# Altium integrated library Karta Radiowa.IntLib: 43 symbols (part 2 of 2)
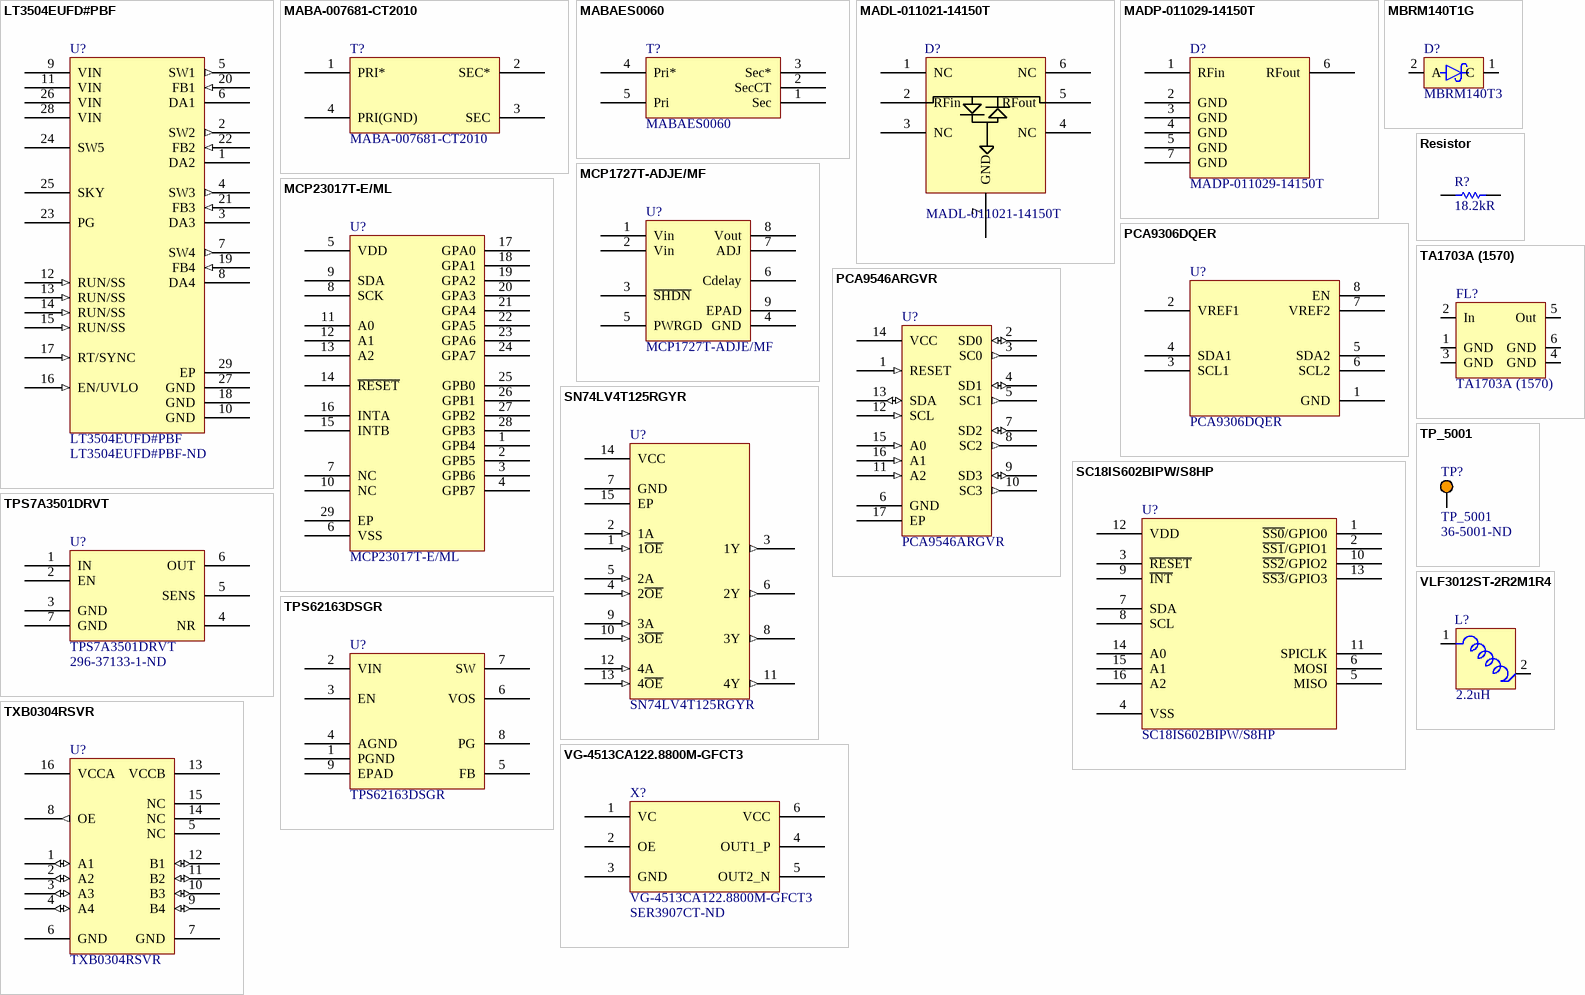
[diagram p2: symbols LT3504EUFD#PBF to VLF3012ST-2R2M1R4]

## PCA9306DQER
designator U?
TEXAS INSTRUMENTS   PCA9306DQER.   IC, SMBus, 5V, X2SON-8; Number of Channels: 2; Propagation Delay: 0.3ns; Min Supply Voltage: 0uV; Logic Function: Translator; Turn-On Delay Time: 1.4ns; Low Level Output Current: 128mA; Output Type: I2C; Supplier 1: Digi-Key; Manufacturer 1: Texas Instruments; Manufacturer Part Number 1: PCA9306DQER; Stock 1: 25002; Pricing 1: 1=0,67000, 10=0,59100, 100=0,45340, 500=0,35844, 1000=0,28675 (USD); RoHS: Yes; Number of Pins: 8; Min Operating Temperature: -40°C; Max Operating Temperature: 85°C; Max Supply Voltage: 5V; Package Quantity: 1; Number of Outputs: 2; Number of Bits: 2; Packaging: Tape and Reel; Length: 1.45mm; Height: 0.35mm; Width: 1.05mm; Radiation Hardening: No; REACH SVHC: No SVHC; Lead Free: Lead Free; ComponentLink1URL: https://datasheet.ciiva.com/22631/1719693-22631024.pdf?src-supplier=Element14; ComponentLink1Description: https://datasheet.ciiva.com/22631/1719693-22631024.pdf?src-supplier=Element14; ComponentLink2URL: https://datasheet.ciiva.com/1899/pca9306-1899328.pdf?src-supplier=Digi-Key; ComponentLink2Description: https://datasheet.ciiva.com/1899/pca9306-1899328.pdf?src-supplier=Digi-Key; ComponentLink3URL: https://datasheet.ciiva.com/15095/getdatasheetpartid-306496-15095555.pdf?src-supplier=Verical; ComponentLink3Description: https://datasheet.ciiva.com/15095/getdatasheetpartid-306496-15095555.pdf?src-supplier=Verical; ComponentLink4URL: https://datasheet.ciiva.com/1504/1862428-1504149.pdf?src-supplier=Element14; ComponentLink4Description: https://datasheet.ciiva.com/1504/1862428-1504149.pdf?src-supplier=Element14; ComponentLink5URL: https://datasheet.ciiva.com/1899/pca9306-1899326.pdf?src-supplier=Digi-Key; ComponentLink5Description: https://datasheet.ciiva.com/1899/pca9306-1899326.pdf?src-supplier=Digi-Key; ComponentLink6URL: https://datasheet.ciiva.com/14287/pca9306-14287374.pdf?src-supplier=Avnet; ComponentLink6Description: https://datasheet.ciiva.com/14287/pca9306-14287374.pdf?src-supplier=Avnet; ComponentLink7URL: https://datasheet.ciiva.com/14287/pca9306-14287470.pdf?src-supplier=Avnet; ComponentLink7Description: https://datasheet.ciiva.com/14287/pca9306-14287470.pdf?src-supplier=Avnet; ComponentLink8URL: https://datasheet.ciiva.com/1899/pca9306-1899327.pdf?src-supplier=Digi-Key; ComponentLink8Description: https://datasheet.ciiva.com/1899/pca9306-1899327.pdf?src-supplier=Digi-Key; ComponentLink9URL: https://datasheet.ciiva.com/26041/pca9306-26041014.pdf?src-supplier=Avnet+Europe; ComponentLink9Description: https://datasheet.ciiva.com/26041/pca9306-26041014.pdf?src-supplier=Avnet+Europe; Supplier Part Number 1: 296-27957-1-ND
footprint PCA9306 (8-XFDFN, Body 1,40x1,00mm, Pitch 0,35mm, IPC High Density)
pins: 1 GND, 2 VREF1, 3 SCL1, 4 SDA1, 5 SDA2, 6 SCL2, 7 VREF2, 8 EN

## PCA9546ARGVR
designator U?
IC I2C/SMBUS SWITCH 4CH 16-VQFN; Manufacturer 1: Texas Instruments; Number of Inputs: 4; Number of Outputs: 1; Max Supply Voltage: 5.5V; Min Supply Voltage: 2.3V; Logic Function: Multiplexer; Bandwidth: 400kHz; Propagation Delay: 1ns; Max Power Dissipation: 400mW; On-State Resistance: 45R; Operating Supply Current: 3uA; Supplier 1: Digi-Key; Manufacturer Part Number 1: PCA9546ARGVR; Stock 1: 3293; Pricing 1: 1=1.95000, 10=1.75200, 100=1.40850, 500=1.15720, 1000=0.95883 (USD); RoHS: Yes; Case/Package: VQFN; Number of Pins: 16; Contact Plating: Gold; Min Operating Temperature: -40°C; Max Operating Temperature: 85°C; Packaging: Tape and Reel; Package Quantity: 1; Number of Channels: 4; Power Dissipation: 400mW; Max Frequency: 400kHz; Nominal Supply Current: 3uA; Quiescent Current: 3uA; Radiation Hardening: No; Lead Free: Lead Free; ComponentLink1URL: https://datasheet.ciiva.com/15087/getdatasheetpartid-194420-15087222.pdf?src-supplier=Verical; ComponentLink1Description: https://datasheet.ciiva.com/15087/getdatasheetpartid-194420-15087222.pdf?src-supplier=Verical; ComponentLink2URL: https://datasheet.ciiva.com/26839/pca9546argvr-26839996.pdf?src-supplier=IIIC; ComponentLink2Description: https://datasheet.ciiva.com/26839/pca9546argvr-26839996.pdf?src-supplier=IIIC; ComponentLink3URL: https://datasheet.ciiva.com/1784/pca9546a-1784308.pdf?src-supplier=Digi-Key; ComponentLink3Description: https://datasheet.ciiva.com/1784/pca9546a-1784308.pdf?src-supplier=Digi-Key; ComponentLink4URL: https://datasheet.ciiva.com/1784/pca9546a-1784309.pdf?src-supplier=Digi-Key; ComponentLink4Description: https://datasheet.ciiva.com/1784/pca9546a-1784309.pdf?src-supplier=Digi-Key; ComponentLink5URL: https://datasheet.ciiva.com/1784/pca9546a-1784310.pdf?src-supplier=Digi-Key; ComponentLink5Description: https://datasheet.ciiva.com/1784/pca9546a-1784310.pdf?src-supplier=Digi-Key; ComponentLink6URL: https://datasheet.ciiva.com/29886/pca9546a-29886952.pdf?src-supplier=Avnet; ComponentLink6Description: https://datasheet.ciiva.com/29886/pca9546a-29886952.pdf?src-supplier=Avnet; ComponentLink7URL: https://datasheet.ciiva.com/14285/pca9546a-14285823.pdf?src-supplier=Avnet; ComponentLink7Description: https://datasheet.ciiva.com/14285/pca9546a-14285823.pdf?src-supplier=Avnet; Supplier Part Number 1: 296-21771-1-ND
footprint PCA9546A (RGV (S-PVQFN-N16))
pins: 1 RESET (in), 2 SD0 (io), 3 SC0 (out), 4 SD1 (io), 5 SC1 (out), 6 GND, 7 SD2 (io), 8 SC2 (out), 9 SD3 (io), 10 SC3 (out), 11 A2 (in), 12 SCL (in), 13 SDA (io), 14 VCC, 15 A0 (in), 16 A1 (in), 17 EP

## Resistor
designator R?, comment 18.2kR
Manufacturer 1: Susumu; Manufacturer Part Number 1: RR0510P-1822-D; Power Rating: 62.5mW; Tolerance: 0.5%; Voltage Rating: 25V; Max Power Dissipation: 63mW; Temperature Coefficient: 25ppm/°C; Voltage Rating (DC): 50V; Supplier 1: Digi-Key; Supplier Part Number 1: RR05P18.2KDCT-ND; Stock 1: 48500; Pricing 1: 1=0.10000, 10=0.07400, 100=0.02850, 1000=0.01254, 2500=0.01083, 5000=0.00969 (USD); RoHS: Yes; Case/Package: 0402; Case Code (Metric): 1005; Case Code (Imperial): 0402; Min Operating Temperature: -55°C; Max Operating Temperature: 125°C; Package Quantity: 1; Resistance: 18.2kR; Packaging: Tape and Reel; Composition: Thin Film; Number of Terminations: 2; Termination: SMD/SMT; Length: 0.039inch; Height: 0.016inch; Width: 0.02inch; Lead Free: Lead Free; ComponentLink1URL: https://datasheet.ciiva.com/2494/rr-data-sheet-2494006.pdf?src-supplier=Digi-Key; ComponentLink1Description: https://datasheet.ciiva.com/2494/rr-data-sheet-2494006.pdf?src-supplier=Digi-Key; ComponentLink2URL: https://datasheet.ciiva.com/2494/rr-data-sheet-2494007.pdf?src-supplier=Digi-Key; ComponentLink2Description: https://datasheet.ciiva.com/2494/rr-data-sheet-2494007.pdf?src-supplier=Digi-Key; ComponentLink3URL: https://datasheet.ciiva.com/2494/rr-data-sheet-2494008.pdf?src-supplier=Digi-Key; ComponentLink3Description: https://datasheet.ciiva.com/2494/rr-data-sheet-2494008.pdf?src-supplier=Digi-Key
footprint RES 0201/0603 (Chip Resistor, 2-Leads, Body 0.60x0.30mm, IPC Medium Density)
footprint RES 0402/1005 (Chip Resistor, 2-Leads, Body 1.0x0.5mm, IPC Medium Density)
footprint RES 0402/1005 RF (Chip Resistor, 2-Leads, Body 1.0x0.5mm, IPC High Density)
footprint RES 0603/1608 (Chip Resistor, 2-Leads, Body 1.60x0.80mm, IPC Medium Density)
footprint RES 0603/1608 RF (Chip Resistor, 2-Leads, Body 1.60x0.80mm, IPC High Density)
footprint RES 0805/2012 (Chip Resistor, 2-Leads, Body 2.00x1.25mm, IPC Medium Density)
footprint RES 0805/2012 RF (Chip Resistor, 2-Leads, Body 2.00x1.25mm, IPC High Density)
footprint RES 1206/3216 (Chip Resistor, 2-Leads, Body 3.13x1.55mm, IPC Medium Density)
footprint RES 1206/3216 RF (Chip Resistor, 2-Leads, Body 3.13x1.55mm, IPC High Density)
pins: 1, 2

## SC18IS602BIPW/S8HP
designator U?
IC BRIDGE SPI/I2C 16TSSOP; Manufacturer 1: NXP Semiconductors; Supplier 1: Digi-Key; Manufacturer Part Number 1: SC18IS602BIPW/S8HP; Stock 1: 121; Pricing 1: 1=2.76000, 10=2.47600, 100=2.02860, 500=1.72690, 1000=1.45642 (USD); RoHS: No; ComponentLink1URL: https://www.nxp.com/docs/en/data-sheet/SC18IS602B.pdf?src-supplier=Digi-Key; ComponentLink1Description: https://www.nxp.com/docs/en/data-sheet/SC18IS602B.pdf?src-supplier=Digi-Key; Supplier Part Number 1: 568-13691-1-ND
footprint SC18IS602B (TSSOP16: plastic thin shrink small outline package; 16 leads; body width 4.4 mm)
pins: 1 ~{SS0}/GPIO0, 2 ~{SS1}/GPIO1, 3 ~{RESET}, 4 VSS, 5 MISO, 6 MOSI, 7 SDA, 8 SCL, 9 ~{INT}, 10 ~{SS2}/GPIO2, 11 SPICLK, 12 VDD, 13 ~{SS3}/GPIO3, 14 A0, 15 A1, 16 A2

## SN74LV4T125RGYR
designator U?
level shifter Automotive 14-Pin VQFN EP T/R; Manufacturer 1: Texas Instruments; Number of Elements: 4; Number of Bits per Element: 1; High Level Output Current: 16mA; Logic Function: Buffer,Inverting,Translator; Quiescent Current: 2uA; Supplier 1: Digi-Key; Manufacturer Part Number 1: SN74LV4T125RGYR; Stock 1: 74112; Pricing 1: 1=1.15000, 10=1.03000, 100=0.80310, 500=0.66342, 1000=0.52376 (USD); RoHS: Yes; Mount: Surface Mount; Case/Package: VQFN; Number of Pins: 14; Contact Plating: Gold; Min Operating Temperature: -40°C; Max Operating Temperature: 125°C; Packaging: Tape and Reel; Low Level Output Current: 16mA; Number of Bits: 4; Radiation Hardening: No; Lead Free: Lead Free; ComponentLink1URL: https://datasheet.ciiva.com/48438/sn74lv4t125-48438269.pdf?src-supplier=Avnet; ComponentLink1Description: https://datasheet.ciiva.com/48438/sn74lv4t125-48438269.pdf?src-supplier=Avnet; Supplier Part Number 1: 296-40546-1-ND
footprint SN74LV4T125RGYR (14-VFQFN Exposed Pad)
pins: 1 1~{OE} (in), 2 1A (in), 3 1Y (out), 4 2~{OE} (in), 5 2A (in), 6 2Y (out), 7 GND, 8 3Y (out), 9 3A (in), 10 3~{OE} (in), 11 4Y (out), 12 4A (in), 13 4~{OE} (in), 14 VCC, 15 EP

## TA1703A (1570)
designator FL?
SAW Filter 1570 MHz; BW: 80 MHz; IL (max): 4.2 dB; Impedance In, Out: 50 Ohm; In Power (max): 10 dBm; Fc: 1570 MHz
footprint Tai-Saw_3x3p6 (TA1251B, 6-Pins, Body 3,00x3,00mmx1,40mm, Pitch 1,20mm, IPC Medium Density)
pins: 1 GND, 2 In, 3 GND, 4 GND, 5 Out, 6 GND

## TP_5001
designator TP?  Supplier Part Number 1: 36-5001-ND
Manufacturer 1: Keystone Electronics; Manufacturer Part Number 1: 5001; Plating: Silver; Body Material: PBT,Bronze; Number of Ports: 1; Insulation: Insulated; Inside Diameter: 1.27mm; Outside Diameter: 2.54mm; Hole Diameter: 1.6mm; Supplier 1: Digi-Key; Stock 1: 352170; Pricing 1: 1=0,35000, 10=0,33500, 25=0,30800, 100=0,30150, 250=0,28304, 500=0,25230, 1000=0,17140, 2500=0,15296, 5000=0,14340 (USD); RoHS: Yes; Mount: Through Hole,PCB; Color: Black; Contact Material: Bronze; Contact Plating: Silver,Tin; Material: Nylon,Bronze,Silver; Housing Color: Black; Packaging: Bulk; Package Quantity: 100; Termination: Through Hole; Number of Contacts: 1; Orientation: Straight; Diameter: 2.54mm; Length: 7.62mm; Height: 0.3inch; Lead Free: Lead Free; REACH SVHC: No SVHC; Flammability Rating: UL94 V-0; ComponentLink1URL: https://datasheet.ciiva.com/27052/1581986-27052611.pdf?src-supplier=Jameco; ComponentLink1Description: https://datasheet.ciiva.com/27052/1581986-27052611.pdf?src-supplier=Jameco; ComponentLink2URL: https://datasheet.ciiva.com/11836/0900766b8009b7c7-11836045.pdf?src-supplier=RSComponents; ComponentLink2Description: https://datasheet.ciiva.com/11836/0900766b8009b7c7-11836045.pdf?src-supplier=RSComponents; ComponentLink3URL: https://datasheet.ciiva.com/22631/1703983-22631100.pdf?src-supplier=Element14; ComponentLink3Description: https://datasheet.ciiva.com/22631/1703983-22631100.pdf?src-supplier=Element14; ComponentLink4URL: https://datasheet.ciiva.com/16318/m60-2p60-16318423.pdf?src-supplier=Future+Electronics; ComponentLink4Description: https://datasheet.ciiva.com/16318/m60-2p60-16318423.pdf?src-supplier=Future+Electronics
footprint Keystone5000 (For Keystone 500x miniature loop terminals)
pins: 1

## TPS7A3501DRVT
designator U?  Supplier Part Number 1: 296-37133-1-ND
TEXAS INSTRUMENTS         TPS7A3501DRVT            LDO Voltage Regulator, Adjustable, 1.71V to 5V in, 330mV drop, 1.21V to 4.5V/1A out, SON-6; Output Current: 1A; Number of Outputs: 1; Output Voltage: 4.5V; Min Current Limit: 1.1A; Polarity: Positive; Quiescent Current: 2.2mA; Supplier 1: Digi-Key; Manufacturer: Texas Instruments; Manufacturer Part Number: TPS7A3501DRVT; Stock 1: 4410; Pricing 1: 1 = 2,31000, 10 = 2,07200, 100 = 1,66520 (USD); RoHS: Yes; Mount: Surface Mount; Number of Pins: 6; Weight: 0.000342oz; Min Operating Temperature: -40°C; Max Operating Temperature: 125°C; Min Input Voltage: 1.71V; Max Input Voltage: 5V; Dropout Voltage: 330mV; Package Quantity: 250; Packaging: Tape and Reel; Max Output Current: 1A; Number of Regulators: 1; Min Output Voltage: 1.21V; Max Output Voltage: 4.5V; Output Type: Adjustable; Radiation Hardening: No; REACH SVHC: No SVHC; Lead Free: Lead Free; ComponentLink1URL: https://datasheet.ciiva.com/28435/1776766-28435910.pdf?src-supplier=Element14; ComponentLink1Description: https://datasheet.ciiva.com/28435/1776766-28435910.pdf?src-supplier=Element14; ComponentLink2URL: https://datasheet.ciiva.com/29569/tps7a3501-29569542.pdf?src-supplier=Digi-Key; ComponentLink2Description: https://datasheet.ciiva.com/29569/tps7a3501-29569542.pdf?src-supplier=Digi-Key; ComponentLink3URL: https://datasheet.ciiva.com/29569/tps7a3501-29569543.pdf?src-supplier=Digi-Key; ComponentLink3Description: https://datasheet.ciiva.com/29569/tps7a3501-29569543.pdf?src-supplier=Digi-Key; ComponentLink4URL: https://datasheet.ciiva.com/29569/tps7a3501-29569544.pdf?src-supplier=Digi-Key; ComponentLink4Description: https://datasheet.ciiva.com/29569/tps7a3501-29569544.pdf?src-supplier=Digi-Key; ComponentLink5URL: https://datasheet.ciiva.com/30016/tps7a3501-30016008.pdf?src-supplier=Avnet; ComponentLink5Description: https://datasheet.ciiva.com/30016/tps7a3501-30016008.pdf?src-supplier=Avnet
footprint TPS7A3501 (6-WDFN Exposed Pad)
pins: 1 IN, 2 EN, 3 GND, 4 NR, 5 SENS, 6 OUT, 7 GND

## TPS62163DSGR
designator U?
IC REG BUCK 5V 1A SYNC 8WSON; Manufacturer 1: Texas Instruments; Switching Frequency: 2.25MHz; Number of Outputs: 1; Max Input Voltage: 17V; Min Input Voltage: 3V; Synchronous Rectifier: Yes; Quiescent Current: 17uA; Output Type: Fixed; Output Configuration: Positive; Supplier 1: Digi-Key; Manufacturer Part Number 1: TPS62163DSGR; Stock 1: 19908; Pricing 1: 1=1.79000, 10=1.61000, 100=1.29440, 500=1.06348, 1000=0.88117 (USD); RoHS: Yes; Case/Package: SOIC; Number of Pins: 8; Contact Plating: Gold; Min Operating Temperature: -40°C; Max Operating Temperature: 125°C; Packaging: Tape and Reel; Package Quantity: 1; Output Voltage: 5V; Output Current: 1A; Max Output Current: 1A; Min Output Voltage: 5V; Max Output Voltage: 5V; Operating Supply Voltage: 17V; REACH SVHC: No SVHC; Lead Free: Lead Free; ComponentLink1URL: https://datasheet.ciiva.com/4880/slvsam2a-198231-4880752.pdf?src-supplier=Mouser; ComponentLink1Description: https://datasheet.ciiva.com/4880/slvsam2a-198231-4880752.pdf?src-supplier=Mouser; ComponentLink2URL: https://datasheet.ciiva.com/2034/tps62160-2034672.pdf?src-supplier=Digi-Key; ComponentLink2Description: https://datasheet.ciiva.com/2034/tps62160-2034672.pdf?src-supplier=Digi-Key; ComponentLink3URL: https://datasheet.ciiva.com/2034/tps62160-2034673.pdf?src-supplier=Digi-Key; ComponentLink3Description: https://datasheet.ciiva.com/2034/tps62160-2034673.pdf?src-supplier=Digi-Key; ComponentLink4URL: https://datasheet.ciiva.com/2034/tps62160-2034674.pdf?src-supplier=Digi-Key; ComponentLink4Description: https://datasheet.ciiva.com/2034/tps62160-2034674.pdf?src-supplier=Digi-Key; Supplier Part Number 1: 296-29898-1-ND
footprint TPS62163 (DSG0008A WSON - 0.8 mm max height)
pins: 1 PGND, 2 VIN, 3 EN, 4 AGND, 5 FB, 6 VOS, 7 SW, 8 PG, 9 EPAD

## TXB0304RSVR
designator U?
IC TRNSLTR BIDIRECTIONAL 16UQFN; Manufacturer 1: Texas Instruments; Nominal Supply Current: 5uA; Max Supply Voltage: 3.6V; Min Supply Voltage: 900mV; Data Rate: 140Mbps; Number of Channels: 4; Propagation Delay: 4.8ns; Logic Function: Translator; Turn-On Delay Time: 18.9ns; High Level Output Current: -20uA; Low Level Output Current: 20uA; Quiescent Current: 10uA; Supplier 1: Digi-Key; Manufacturer Part Number 1: TXB0304RSVR; Stock 1: 1758; Pricing 1: 1=1.45000, 10=1.29700, 100=1.01160, 500=0.83564, 1000=0.65972 (USD); RoHS: Yes; Mount: Surface Mount; Number of Pins: 16; Contact Plating: Gold; Min Operating Temperature: -40°C; Max Operating Temperature: 85°C; Packaging: Tape and Reel; Package Quantity: 1; Number of Bits: 4; Number of Inputs: 4; Number of Outputs: 4; Radiation Hardening: No; REACH SVHC: No SVHC; Lead Free: Lead Free; ComponentLink1URL: https://datasheet.ciiva.com/1900/txb0304-1900817.pdf?src-supplier=Digi-Key; ComponentLink1Description: https://datasheet.ciiva.com/1900/txb0304-1900817.pdf?src-supplier=Digi-Key; ComponentLink2URL: https://datasheet.ciiva.com/15096/getdatasheetpartid-490462-15096317.pdf?src-supplier=Verical; ComponentLink2Description: https://datasheet.ciiva.com/15096/getdatasheetpartid-490462-15096317.pdf?src-supplier=Verical; ComponentLink3URL: https://datasheet.ciiva.com/1900/txb0304-1900818.pdf?src-supplier=Digi-Key; ComponentLink3Description: https://datasheet.ciiva.com/1900/txb0304-1900818.pdf?src-supplier=Digi-Key; ComponentLink4URL: https://datasheet.ciiva.com/1900/txb0304-1900819.pdf?src-supplier=Digi-Key; ComponentLink4Description: https://datasheet.ciiva.com/1900/txb0304-1900819.pdf?src-supplier=Digi-Key; ComponentLink5URL: https://datasheet.ciiva.com/14287/txb0304-14287243.pdf?src-supplier=Avnet; ComponentLink5Description: https://datasheet.ciiva.com/14287/txb0304-14287243.pdf?src-supplier=Avnet; Supplier Part Number 1: 296-29681-1-ND
footprint TXB0304 (RSV0016A UQFN - 0.55 mm max height)
pins: 1 A1 (io), 2 A2 (io), 3 A3 (io), 4 A4 (io), 5 NC, 6 GND, 7 GND, 8 OE (out), 9 B4 (io), 10 B3 (io), 11 B2 (io), 12 B1 (io), 13 VCCB, 14 NC, 15 NC, 16 VCCA

## VG-4513CA122.8800M-GFCT3
designator X?  Supplier Part Number 1: SER3907CT-ND
OSC VCXO 122.88MHZ LVPECL SMD; Manufacturer: Epson; Max Supply Current: 65mA; Supplier 1: Digi-Key; Manufacturer Part Number: VG-4513CA122.8800M-GFCT3; Stock 1: 438; Pricing 1: 1 = 9,91000, 10 = 9,29000, 50 = 8,97980, 100 = 8,67020 (USD); RoHS: Yes; Mount: Surface Mount; Case/Package: SMD/SMT; Min Operating Temperature: -40°C; Max Operating Temperature: 85°C; Packaging: Tape and Reel; Frequency: 122.88MHz; Length: 0.276inch; Height: 0.071inch; Width: 0.197inch; Lead Free: Lead Free; ComponentLink1URL: https://datasheet.ciiva.com/29626/vg-4513ca-partnumber-29626986.pdf?src-supplier=Digi-Key; ComponentLink1Description: https://datasheet.ciiva.com/29626/vg-4513ca-partnumber-29626986.pdf?src-supplier=Digi-Key; ComponentLink2URL: https://datasheet.ciiva.com/29626/vg-4513ca-partnumber-29626987.pdf?src-supplier=Digi-Key; ComponentLink2Description: https://datasheet.ciiva.com/29626/vg-4513ca-partnumber-29626987.pdf?src-supplier=Digi-Key; ComponentLink3URL: https://datasheet.ciiva.com/29626/076-vg-4513ca-cb-e13ya-29626988.pdf?src-supplier=Digi-Key; ComponentLink3Description: https://datasheet.ciiva.com/29626/076-vg-4513ca-cb-e13ya-29626988.pdf?src-supplier=Digi-Key
footprint VG-4513CA (SON, 6-Leads, Body 7,00x5,00mm, Pitch 2,60mm, IPC High Density)
pins: 1 VC, 2 OE, 3 GND, 4 OUT1_P, 5 OUT2_N, 6 VCC

## VLF3012ST-2R2M1R4
designator L?  Inductance: 2.2uH  (hidden comment: VLF3012ST-2R2M1R4)
FIXED IND 2.2UH 1.4A 72 MOHM SMD; Manufacturer 1: TDK; Core Material: Ferrite; Tolerance: 20%; Shielding: Shielded; DC Resistance (DCR): 72mR; Test Frequency: 1MHz; Supplier 1: Digi-Key; Manufacturer Part Number 1: VLF3012ST-2R2M1R4; Stock 1: 348; Pricing 1: 1=1.09000, 10=1.00900, 100=0.72970 (USD); RoHS: Yes; Mount: Surface Mount; Case/Package: Nonstandard; Min Operating Temperature: -40°C; Max Operating Temperature: 105°C; Packaging: Tape and Reel; Package Quantity: 2000; Current Rating: 1.4A; Composition: Wirewound; Max DC Current: 1.4A; Termination: SMD/SMT; DC Current: 1.4A; Military Standard: Not; Length: 0.118inch; Height: 1.2mm; Width: 0.11inch; Height - Seated (Max): 0.047inch; Depth: 2.8mm; Lead Free: Lead Free; ComponentLink1URL: http://components.arrow.com/part/dataview/0323_01997643?src-supplier=Arrow+Europe; ComponentLink1Description: http://components.arrow.com/part/dataview/0323_01997643?src-supplier=Arrow+Europe; ComponentLink2URL: https://media.digikey.com/pdf/Data%20Sheets/TDK%20PDFs/VLF3012S.pdf?src-supplier=Digi-Key; ComponentLink2Description: https://media.digikey.com/pdf/Data%20Sheets/TDK%20PDFs/VLF3012S.pdf?src-supplier=Digi-Key; ComponentLink3URL: http://www.tdk.com/s_details.php?class_code=TJA024&item_roots_key=VLF3012ST-2R2M1R4C46421010&item_name=VLF3012ST-2R2M1R4&src-supplier=Avnet; ComponentLink3Description: http://www.tdk.com/s_details.php?class_code=TJA024&item_roots_key=VLF3012ST-2R2M1R4C46421010&item_name=VLF3012ST-2R2M1R4&src-supplier=Avnet; ComponentLink4URL: https://product.tdk.com/en/search/inductor/inductor/smd/info?part_no=VLF3010AT-2R2M1R0&src-supplier=Mouser; ComponentLink4Description: https://product.tdk.com/en/search/inductor/inductor/smd/info?part_no=VLF3010AT-2R2M1R0&src-supplier=Mouser; Supplier Part Number 1: 445-4200-1-ND
footprint VLF3012ST-2R2M1R4 (Precision Wire Wound Inductor, 2-Leads, Body 3.00x2.80mm, IPC High Density)
pins: 1, 2